# Altium schematic symbol library 2020-05-10_12-35-11.SchLib: 2 symbols
Pins are listed as number, name and electrical type; pins without a type are passive.

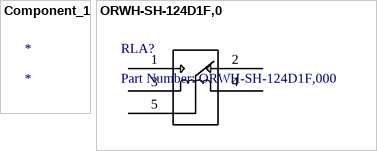
[diagram p0: symbols Component_1 to ORWH-SH-124D1F,0]

## Component_1
designator *

## ORWH-SH-124D1F,0
designator RLA?, comment Part Number: ORWH-SH-124D1F,000
No Description Available; TE_Part_Number: ORWH-SH-124D1F,000 (1-1721150-5); Built_By: EMA_Kyle; Vendor: TE Connectivity; Contact_Arrangement: 1 Form C (CO); Copyright: Copyright (C) 2018 Accelerated Designs. All rights reserved; Manufacturer_Part_Number: ORWH-SH-124D1F,000; Datasheet_Used: https://www.te.com/commerce/DocumentDelivery/DDEController?Action=showdoc&DocId=Customer+Drawing%7F1721150%7FD%7Fpdf%7FEnglish%7FENG_CD_1721150_D.pdf%7F1-1721150-0; Product_Type: -; Relay_Type: -; Maximum_Switching_Current: -; Maximum_Switching_Voltage: -; RefDes: RefDes; Type: DEV; Value: Value
footprint relay_1-1721150-
pins: 1, 2, 3, 4, 5